# Altium footprint library ECSTXO20CSMV4320AYTR.PcbLib: 1 footprints
Each footprint in its own frame and in the unit in brackets; x right, y up, seen from the top. Pads: shape width x height; smd on the part's side, far side on the other; paste and mask are expansions set on the pad; w line width, h text height; cw(c..) or ccw(c..) is an arc to the next point about the centre after c.
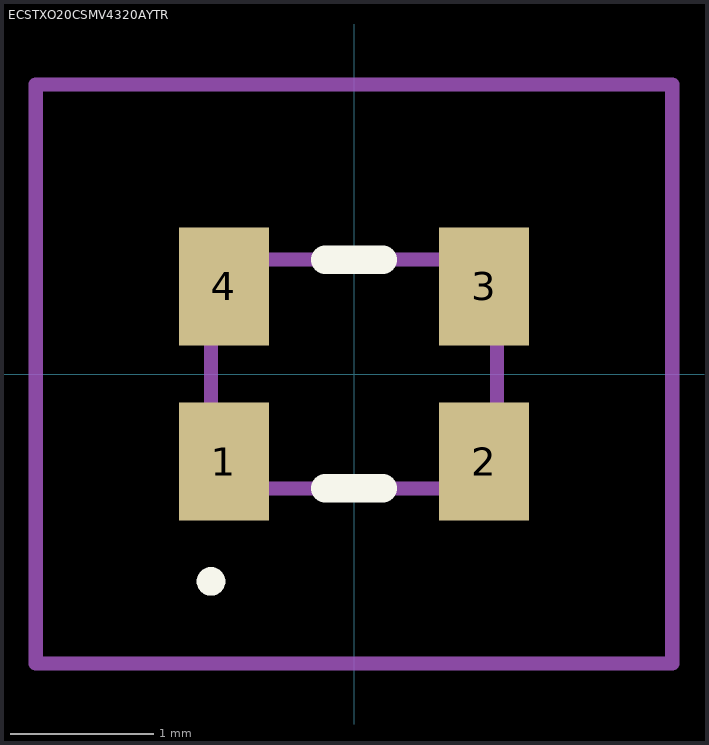
[diagram p0: the footprint, top view; thin cyan lines are the x and y axes]

## ECSTXO20CSMV4320AYTR [mm]
pads (4):
  rect 0.63x0.825 smd: 1(-0.91,-0.613) 2(0.91,-0.613) 3(0.91,0.613) 4(-0.91,0.613)
Top Overlay:
  lines w0.1: -1,-1.5 -1,-1.5 ; -1,-1.5 ccw(c-1,-1.45) -1,-1.4 ; -1,-1.5 cw(c-1,-1.45) -1,-1.4 ; -1,-1.5 -1,-1.5 ; -1,-1.5 ccw(c-1,-1.45) -1,-1.4 ; -1,-1.4 -1,-1.4
  lines w0.2: -0.2,-0.8 0.2,-0.8 ; -0.2,0.8 0.2,0.8
Mechanical 15:
  lines w0.1: -1,-0.8 1,-0.8 1,0.8 -1,0.8 -1,-0.8
Mechanical 20:
  lines w0.1: -2.225,-2.025 2.225,-2.025 2.225,2.025 -2.225,2.025 -2.225,-2.025